# Altium schematic symbol library Schlib1.SchLib: 9 symbols
Pins are listed as number, name and electrical type; pins without a type are passive.

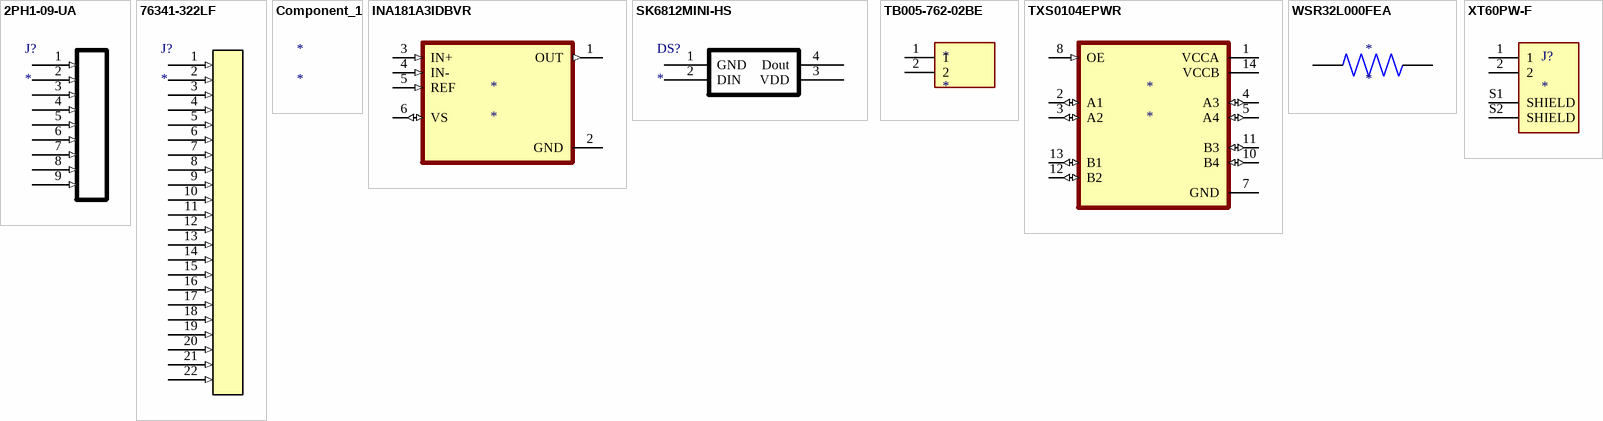
[diagram p0: symbols 2PH1-09-UA to XT60PW-F]

## 2PH1-09-UA
designator J?
Conn Unshrouded Header HDR 9 POS 2mm Solder ST Thru-Hole; Manufacturer: Adam Tech; Manufacturer Part Number: 2PH1-09-UA; Contact Resistance: 20mΩ; Current Rating: 1A; Insulation Resistance: 5GΩ; Supplier: DigiKey; Supplier Part Number: 2057-2PH1-09-UA-ND; RoHS: Compliant; Category: Card Edge Connectors; Stock: 1766; Pricing: 1=0.17, 10=0.141, 100=0.1195, 500=0.1066, 1000=0.10151, 5000=0.0906, 10000=0.08627 (USD); Contact Gender: Male; Contact Material: Brass; Lead Free: Lead Free; Lifecycle Status: Production; Max Operating Temperature: 105°C; Min Operating Temperature: -55°C; Pins: 9; Number of Rows: 1; REACH SVHC: Yes; Terminal Pitch: 2mm; ComponentLink1URL: https://datasheet.octopart.com:443/2PH1-09-UA-Adam-Tech-datasheet-21182828.pdf?src-supplier=IHS; ComponentLink1Description: https://datasheet.octopart.com:443/2PH1-09-UA-Adam-Tech-datasheet-21182828.pdf?src-supplier=IHS; ComponentLink2URL: https://datasheet.octopart.com:443/2PH1-09-UA-Adam-Tech-datasheet-12511781.pdf?src-supplier=Future+Electronics; ComponentLink2Description: https://datasheet.octopart.com:443/2PH1-09-UA-Adam-Tech-datasheet-12511781.pdf?src-supplier=Future+Electronics; ComponentLink3URL: http://sigma.octopart.com:80/rohs_statement/Adam-Tech-company-22.pdf?src-supplier=Compliance+Statements; ComponentLink3Description: http://sigma.octopart.com:80/rohs_statement/Adam-Tech-company-22.pdf?src-supplier=Compliance+Statements; ComponentLink4URL: http://sigma.octopart.com:80/reach_statement/Adam-Tech-company-23.pdf?src-supplier=Compliance+Statements; ComponentLink4Description: http://sigma.octopart.com:80/reach_statement/Adam-Tech-company-23.pdf?src-supplier=Compliance+Statements
footprint 2AMPHENOL_76341-322LF - duplicate
pins: 1 (in), 2 (in), 3 (in), 4 (in), 5 (in), 6 (in), 7 (in), 8 (in), 9 (in)

## 76341-322LF
designator J?
FCI 2.54mm 22 Way 1 Row Straight IDC Connector Through Hole Board to Board; Manufacturer: Amphenol ICC / FCI; Manufacturer Part Number: 76341-322LF; Manufacturer Series: 76341; Connector Type: BOARD CONNECTOR; Option: General Purpose; Body/Shell Style: RECEPTACLE; Contact Pattern: RECTANGULAR; Contact Resistance: 20mR; Contact Style: SQ PIN-SKT; Dielectric Withstanding Voltage (AC): 1.4kV; Filter Feature: No; Insulation Resistance: 1GR; Number Of Connectors: 1; Polarization Key: POLARIZED HOUSING; Rated Current (Signal): 2A; Number of Contacts: 22; Body Breadth: 0.1inch; Body Depth: 0.276inch; Body Length: 2.12inch; Mounting Option 1: LOCKING; Plating Thickness: 30uin; Reference Standard: UL; Reliability: COMMERCIAL; Supplier: Digikey; Supplier Part Number: 609-76341-322LF-ND; RoHS: Yes; Category: Connectors; Stock: 193; Pricing: 1=3.08, 10=2.616, 100=2.2236, 500=1.98482, 3600=1.72692 (USD); Mounting Technology: Board; Contact Material: Bronze; Contact Finish - Mating: GOLD (30); Contact Finish - Termination: Matte Tin (Sn) - with Nickel (Ni) barrier; Insulation Color: Blue; Insulation Material: Thermoplastic; Min Operating Temperature: -65°C; Max Operating Temperature: 125°C; JESD-609 Code: e3; Contact Gender: Female; Mixed Contacts: No; Mounting Style: STRAIGHT; Number Of PCB Rows: 1; Number of Rows Loaded: 1; PCB Contact Pattern: RECTANGULAR; Termination: Solder; Mating Contact Pitch: 0.1inch; Terminal Length: 0.114inch; Terminal Pitch: 2.54mm; Flammability Rating: UL94 V-0; DIN Conformance: No; IEC Conformance: No; MIL Conformance: No; Reach SVHC Compliant: Yes; RoHS Compliant: Yes; ComponentLink1URL: https://datasheet.ciiva.com/8050/320502-8050326.pdf?src-supplier=Element14; ComponentLink1Description: https://datasheet.ciiva.com/8050/320502-8050326.pdf?src-supplier=Element14; ComponentLink2URL: https://datasheet.ciiva.com/412/76341-412489.pdf?src-supplier=Digikey; ComponentLink2Description: https://datasheet.ciiva.com/412/76341-412489.pdf?src-supplier=Digikey; ComponentLink3URL: https://datasheet.ciiva.com/17014/70247770-17014075.pdf?src-supplier=Allied+Electronics; ComponentLink3Description: https://datasheet.ciiva.com/17014/70247770-17014075.pdf?src-supplier=Allied+Electronics; ComponentLink4URL: https://datasheet.ciiva.com/10126/76341-10126892.pdf?src-supplier=Avnet; ComponentLink4Description: https://datasheet.ciiva.com/10126/76341-10126892.pdf?src-supplier=Avnet
footprint AMPHENOL_76341-322LF
pins: 1 (in), 2 (in), 3 (in), 4 (in), 5 (in), 6 (in), 7 (in), 8 (in), 9 (in), 10 (in), 11 (in), 12 (in), 13 (in), 14 (in), 15 (in), 16 (in), 17 (in), 18 (in), 19 (in), 20 (in), 21 (in), 22 (in)

## Component_1
designator *

## INA181A3IDBVR
designator *
Operational Amplifier, 1 Func, 500uV Offset-Max, PDSO6; Manufacturer: Texas Instruments; Manufacturer Part Number: INA181A3IDBVR; Package Body Material: Plastic; Average Bias Current-Max (IIB): 75uA; Common-mode Reject Ratio-Nom: 100dB; Channels: 1; Slew Rate: 2V/µs; Supply Voltage Limit-Max: 5.5V; Nominal Supply Voltage: 5V; Unity Gain BW-Nom: 350kHz; Supplier: Digikey; Supplier Part Number: 296-47658-1-ND; RoHS: Yes; Category: Amplifiers - Op Amps, Buffer, Instrumentation; Stock: 8886; Pricing: 1=0.43, 10=0.297, 25=0.2652, 100=0.2296, 250=0.21268, 500=0.20246, 1000=0.19404 (USD); Case/Package: SOP; Pins: 6; Package Shape: Rectangular; Terminal Finish: Tin; Min Operating Temperature: -40°C; Max Operating Temperature: 125°C; JESD-609 Code: e3; Amplifier Type: OPERATIONAL AMPLIFIER; Input Offset Voltage-Max: 500uV; JESD-30 Code: R-PDSO-G6; Moisture Sensitivity Level: 1; Package Style: SMALL OUTLINEMeter; Peak Reflow Temperature (Cel): 260°C; Surface Mount: Yes; Terminal Form: Gull Wing; Terminal Position: DUAL; Temperature Grade: AUTOMOTIVE; Reach SVHC Compliant: Yes; RoHS Compliant: Yes; ComponentLink1URL: https://www.ti.com:443/lit/ds/symlink/ina181.pdf?src-supplier=IHS+Markit; ComponentLink1Description: https://www.ti.com:443/lit/ds/symlink/ina181.pdf?src-supplier=IHS+Markit; ComponentLink2URL: http://www.ti.com/lit/ds/symlink/ina181.pdf?src-supplier=Digikey; ComponentLink2Description: http://www.ti.com/lit/ds/symlink/ina181.pdf?src-supplier=Digikey
footprint SOT95P280X145-6N
pins: 1 OUT (out), 2 GND (power), 3 IN+ (in), 4 IN- (in), 5 REF (in), 6 VS (io)

## SK6812MINI-HS
designator DS?
footprint LED
pins: 1 GND, 2 DIN, 3 VDD, 4 Dout

## TB005-762-02BE
designator *
Barrier Strip Terminal Block; Manufacturer: Same Sky; Manufacturer Part Number: TB005-762-02BE; Supplier: Digikey; Supplier Part Number: 102-6189-ND; RoHS: Yes; Category: Terminal Blocks; Stock: 4809; Pricing: 1=0.78, 10=0.574, 25=0.5, 50=0.4504, 100=0.4073, 250=0.36028, 600=0.3253, 1200=0.30358, 5400=0.27068 (USD); ComponentLink1URL: https://www.cuidevices.com/product/resource/digikeypdf/tb005-762.pdf?src-supplier=Digikey; ComponentLink1Description: https://www.cuidevices.com/product/resource/digikeypdf/tb005-762.pdf?src-supplier=Digikey; ComponentLink2URL: https://datasheet.octopart.com/TB005-762-02BE-Same-Sky-datasheet-182050252.pdf?src-supplier=Future+Electronics; ComponentLink2Description: https://datasheet.octopart.com/TB005-762-02BE-Same-Sky-datasheet-182050252.pdf?src-supplier=Future+Electronics; ComponentLink3URL: https://datasheet.octopart.com/TB005-762-02BE-CUI-Devices-datasheet-142371921.pdf?src-supplier=Future+Electronics; ComponentLink3Description: https://datasheet.octopart.com/TB005-762-02BE-CUI-Devices-datasheet-142371921.pdf?src-supplier=Future+Electronics; ComponentLink4URL: https://datasheet.octopart.com/TB005-762-02BE-Same-Sky-datasheet-182881445.pdf?src-supplier=Electro+Sonic; ComponentLink4Description: https://datasheet.octopart.com/TB005-762-02BE-Same-Sky-datasheet-182881445.pdf?src-supplier=Electro+Sonic; ComponentLink5URL: https://datasheet.octopart.com/TB005-762-02BE-Same-Sky-datasheet-189105715.pdf?src-supplier=Master+Electronics; ComponentLink5Description: https://datasheet.octopart.com/TB005-762-02BE-Same-Sky-datasheet-189105715.pdf?src-supplier=Master+Electronics
footprint CUI_TB005-762-02BE
pins: 1, 2

## TXS0104EPWR
designator *
Four-bit bidirectional voltage-level shifter for open-drain and push-pull applications 14-TSSOP -40 to 85; Manufacturer: Texas Instruments; Manufacturer Part Number: TXS0104EPWR; Manufacturer Lifecycle Status: ACTIVE; Data Rate: 24mbps; High Level Output Current: -20µA; Logic Function: Translator; Low Level Output Current: 1mA; Max Junction Temperature (Tj): 150°C; Max Supply Voltage: 5.5V; Min Supply Voltage: 1.65V; Number of Bits: 4; Output Current: 50mA; Propagation Delay: 4.6ns; Quiescent Current: 14.4µA; Turn-On Delay Time: 260ns; Supplier: DigiKey; Supplier Part Number: 296-20697-1-ND; RoHS: Compliant; Category: Voltage Level Shifters; Stock: 10313; Pricing: 1=0.89, 10=0.637, 25=0.574, 100=0.5046, 250=0.47152, 500=0.45154, 1000=0.44982 (USD); Ambient Temperature Range High: 85°C; Case/Package: TSSOP; Height: 0m; Lead Free: Lead Free; Length: 5mm; Lifecycle Status: Production; Max Operating Temperature: 85°C; Min Operating Temperature: -40°C; Mounting Technology: Surface Mount; Number of Channels: 4; Number of Circuits: 4; Number of Inputs: 4; Number of Outputs: 4; Pins: 14; Output Type: Voltage; Radiation Hardening: No; REACH SVHC: No; Schedule B: 8542390000, 8542390000|8542390000|8542390000|8542390000|8542390000; Thickness: 1mm; Weight: 57.209338mg; Width: 4.4mm; ComponentLink1URL: https://sigma.octopart.com:443/182471031/technical_drawing/Texas-Instruments-TXS0104EPWR.pdf?src-supplier=Texas+Instruments; ComponentLink1Description: https://sigma.octopart.com:443/182471031/technical_drawing/Texas-Instruments-TXS0104EPWR.pdf?src-supplier=Texas+Instruments; ComponentLink2URL: https://octopart.com:443/opatz8j6/c1?t=A2ecHDxdJGjDAq4NBhJRiZPmL2CD_8kJZcxviuh7ZFAd3jZwv8W9g4VrjS-XRlrKNyewci_bqJpQKnMRwhRavu5j0M52huz7eVraYXJdf1YcFewkCEGAac4DOqiVundXHp94h6fAntiNDuHpHeIY6FEzQma-AUL-fMv0-cOOnY5c6NUImRUz1sGG57bLMf0MEzbW7JJ4b2DNv9SIOCjG8EcWoGK4lZefDl-MqjXcsqptAEqtTgToNsyiahvqdHSZV6fbzujHBwvcjF3WCYk5xhaRbnSNJ2IKwvy4TlEMkhBZAjVP3ShsDyftFg7MedKJUazb0Wnx9uNKWn-JComf2Ask4EuiZb05Gf0f6HYTt4os90O2Y8DL6a1-9W2qGWbmJjqh&src-supplier=Texas+Instruments; ComponentLink2Description: https://octopart.com:443/opatz8j6/c1?t=A2ecHDxdJGjDAq4NBhJRiZPmL2CD_8kJZcxviuh7ZFAd3jZwv8W9g4VrjS-XRlrKNyewci_bqJpQKnMRwhRavu5j0M52huz7eVraYXJdf1YcFewkCEGAac4DOqiVundXHp94h6fAntiNDuHpHeIY6FEzQma-AUL-fMv0-cOOnY5c6NUImRUz1sGG57bLMf0MEzbW7JJ4b2DNv9SIOCjG8EcWoGK4lZefDl-MqjXcsqptAEqtTgToNsyiahvqdHSZV6fbzujHBwvcjF3WCYk5xhaRbnSNJ2IKwvy4TlEMkhBZAjVP3ShsDyftFg7MedKJUazb0Wnx9uNKWn-JComf2Ask4EuiZb05Gf0f6HYTt4os90O2Y8DL6a1-9W2qGWbmJjqh&src-supplier=Texas+Instruments; ComponentLink3URL: https://datasheet.octopart.com:443/TXS0104EPWR-Texas-Instruments-datasheet-17423550.pdf?src-supplier=Texas+Instruments; ComponentLink3Description: https://datasheet.octopart.com:443/TXS0104EPWR-Texas-Instruments-datasheet-17423550.pdf?src-supplier=Texas+Instruments; ComponentLink4URL: https://datasheet.octopart.com:443/TXS0104EPWR-Texas-Instruments-datasheet-10254998.pdf?src-supplier=Texas+Instruments; ComponentLink4Description: https://datasheet.octopart.com:443/TXS0104EPWR-Texas-Instruments-datasheet-10254998.pdf?src-supplier=Texas+Instruments; ComponentLink5URL: https://sigma.octopart.com:443/49249819/technical_drawing/Texas-Instruments-TXS0104EPWR.pdf?src-supplier=Texas+Instruments; ComponentLink5Description: https://sigma.octopart.com:443/49249819/technical_drawing/Texas-Instruments-TXS0104EPWR.pdf?src-supplier=Texas+Instruments; ComponentLink6URL: https://datasheet.octopart.com:443/TXS0104EPWR-Texas-Instruments-datasheet-151984.pdf?src-supplier=Texas+Instruments; ComponentLink6Description: https://datasheet.octopart.com:443/TXS0104EPWR-Texas-Instruments-datasheet-151984.pdf?src-supplier=Texas+Instruments; ComponentLink7URL: https://datasheet.octopart.com:443/TXS0104EPWR-Texas-Instruments-datasheet-34148596.pdf?src-supplier=Farnell; ComponentLink7Description: https://datasheet.octopart.com:443/TXS0104EPWR-Texas-Instruments-datasheet-34148596.pdf?src-supplier=Farnell; ComponentLink8URL: https://datasheet.octopart.com:443/TXS0104EPWR-Texas-Instruments-datasheet-21828336.pdf?src-supplier=Farnell; ComponentLink8Description: https://datasheet.octopart.com:443/TXS0104EPWR-Texas-Instruments-datasheet-21828336.pdf?src-supplier=Farnell; ComponentLink9URL: https://datasheet.octopart.com:443/TXS0104EPWR-Texas-Instruments-datasheet-17023331.pdf?src-supplier=Upverter; ComponentLink9Description: https://datasheet.octopart.com:443/TXS0104EPWR-Texas-Instruments-datasheet-17023331.pdf?src-supplier=Upverter; ComponentLink10URL: https://datasheet.octopart.com:443/TXS0104EPWR-Texas-Instruments-datasheet-66618006.pdf?src-supplier=element14+APAC; ComponentLink10Description: https://datasheet.octopart.com:443/TXS0104EPWR-Texas-Instruments-datasheet-66618006.pdf?src-supplier=element14+APAC; ComponentLink11URL: https://datasheet.octopart.com:443/TXS0104EPWR.-Texas-Instruments-datasheet-48033022.pdf?src-supplier=element14+APAC; ComponentLink11Description: https://datasheet.octopart.com:443/TXS0104EPWR.-Texas-Instruments-datasheet-48033022.pdf?src-supplier=element14+APAC; ComponentLink12URL: https://datasheet.octopart.com:443/TXS0104EPWR-Texas-Instruments-datasheet-32026794.pdf?src-supplier=Newark; ComponentLink12Description: https://datasheet.octopart.com:443/TXS0104EPWR-Texas-Instruments-datasheet-32026794.pdf?src-supplier=Newark; ComponentLink13URL: https://datasheet.octopart.com:443/TXS0104EPWR-Texas-Instruments-datasheet-164421215.pdf?src-supplier=SHENGYU+ELECTRONICS; ComponentLink13Description: https://datasheet.octopart.com:443/TXS0104EPWR-Texas-Instruments-datasheet-164421215.pdf?src-supplier=SHENGYU+ELECTRONICS; ComponentLink14URL: https://datasheet.octopart.com:443/TXS0104EPWR-Texas-Instruments-datasheet-165804952.pdf?src-supplier=LCSC; ComponentLink14Description: https://datasheet.octopart.com:443/TXS0104EPWR-Texas-Instruments-datasheet-165804952.pdf?src-supplier=LCSC; ComponentLink15URL: https://datasheet.octopart.com:443/TXS0104EPWR-Texas-Instruments-datasheet-159118389.pdf?src-supplier=LCSC; ComponentLink15Description: https://datasheet.octopart.com:443/TXS0104EPWR-Texas-Instruments-datasheet-159118389.pdf?src-supplier=LCSC; ComponentLink16URL: https://datasheet.octopart.com:443/TXS0104EPWR-Texas-Instruments-datasheet-137316104.pdf?src-supplier=Future+Electronics; ComponentLink16Description: https://datasheet.octopart.com:443/TXS0104EPWR-Texas-Instruments-datasheet-137316104.pdf?src-supplier=Future+Electronics; ComponentLink17URL: https://datasheet.octopart.com:443/TXS0104EPWR-Texas-Instruments-datasheet-10979038.pdf?src-supplier=Arrow+Electronics; ComponentLink17Description: https://datasheet.octopart.com:443/TXS0104EPWR-Texas-Instruments-datasheet-10979038.pdf?src-supplier=Arrow+Electronics; ComponentLink18URL: https://datasheet.octopart.com:443/TXS0104EPWR-Texas-Instruments-datasheet-18313.pdf?src-supplier=DigiKey; ComponentLink18Description: https://datasheet.octopart.com:443/TXS0104EPWR-Texas-Instruments-datasheet-18313.pdf?src-supplier=DigiKey; ComponentLink19URL: http://sigma.octopart.com:80/reach_statement/Texas-Instruments-company-64.pdf?src-supplier=Compliance+Statements; ComponentLink19Description: http://sigma.octopart.com:80/reach_statement/Texas-Instruments-company-64.pdf?src-supplier=Compliance+Statements; ComponentLink20URL: http://sigma.octopart.com:80/conflict_mineral_statement/Texas-Instruments-company-63.pdf?src-supplier=Compliance+Statements; ComponentLink20Description: http://sigma.octopart.com:80/conflict_mineral_statement/Texas-Instruments-company-63.pdf?src-supplier=Compliance+Statements
footprint SOP65P640X120-14N
pins: 1 VCCA (power), 2 A1 (io), 3 A2 (io), 4 A3 (io), 5 A4 (io), 7 GND (power), 8 OE (in), 10 B4 (io), 11 B3 (io), 12 B2 (io), 13 B1 (io), 14 VCCB (power)

## WSR32L000FEA
designator *
Fixed Resistor, Metal Strip, 3W, 0.002ohm, 0.077V, 1% +/-Tol, 600ppm/Cel, Surface Mount, 4527; Manufacturer: Vishay Dale; Manufacturer Part Number: WSR32L000FEA; Rated Temperature: 70°C; Value: 2mR; Temperature Coefficient (ppm/Cel): -600,600; Package Height: 2.41mm; Package Length: 11.56mm; Package Width: 6.98mm; Reference Standard: AEC-Q200; Supplier: Digikey; Supplier Part Number: WSRB-.002CT-ND; RoHS: Yes; Category: Chip SMD Resistors; Stock: 1901; Pricing: 1=1.54, 10=1.022, 25=0.906, 50=0.8386, 100=0.7852, 250=0.73096, 500=0.69258 (USD); Mounting Technology: Surface Mount; Pins: 2; Package Shape: Rectangular; Case/Package: 4527; Terminal Finish: Tin; Min Operating Temperature: -65°C; Max Operating Temperature: 275°C; Tolerance: 1%; JESD-609 Code: e2; Resistor Type: FIXED RESISTOR; Construction: Chip; Packaging: Tape and Reel; Power: 3W; Technology: METAL STRIP; Termination: Wraparound; Reach SVHC Compliant: Yes; RoHS Compliant: Yes; ComponentLink1URL: https://datasheet.ciiva.com:443/pdfs/VipMasterIC/IC/VISH/VISH-S-A0007103483/VISH-S-A0007103483-1.pdf?src-supplier=IHS+Markit; ComponentLink1Description: https://datasheet.ciiva.com:443/pdfs/VipMasterIC/IC/VISH/VISH-S-A0007103483/VISH-S-A0007103483-1.pdf?src-supplier=IHS+Markit; ComponentLink2URL: https://datasheet.ciiva.com/11812/0900766b80d81e5e-11812948.pdf?src-supplier=Rs; ComponentLink2Description: https://datasheet.ciiva.com/11812/0900766b80d81e5e-11812948.pdf?src-supplier=Rs; ComponentLink3URL: https://datasheet.ciiva.com/2484/wsr-2484757.pdf?src-supplier=Digikey; ComponentLink3Description: https://datasheet.ciiva.com/2484/wsr-2484757.pdf?src-supplier=Digikey; ComponentLink4URL: https://datasheet.ciiva.com/2484/wsr-2484758.pdf?src-supplier=Digikey; ComponentLink4Description: https://datasheet.ciiva.com/2484/wsr-2484758.pdf?src-supplier=Digikey; ComponentLink5URL: https://datasheet.ciiva.com/2484/wsr-2484759.pdf?src-supplier=Digikey; ComponentLink5Description: https://datasheet.ciiva.com/2484/wsr-2484759.pdf?src-supplier=Digikey; ComponentLink6URL: https://datasheet.ciiva.com/16375/wsr-16375639.pdf?src-supplier=Future+Electronics; ComponentLink6Description: https://datasheet.ciiva.com/16375/wsr-16375639.pdf?src-supplier=Future+Electronics
footprint RESM11569X253N
pins: 1, 2

## XT60PW-F
designator J?
Socket DC Supply Connector Female; MP: XT60PW-F; MF: AMASS; SnapEDA_Link: https://www.snapeda.com/parts/XT60PW-F/AMASS/view-part/?ref=snap; Package: Package; Availability: Not in stock; Price: None; Check_prices: https://www.snapeda.com/parts/XT60PW-F/AMASS/view-part/?ref=eda; Value: *
footprint AMASS_XT60PW-F
pins: 1, 2, S1 SHIELD, S2 SHIELD